# Altium footprint library ACB_PcbLib.PcbLib: 167 footprints (part 5 of 11)
Each footprint in its own frame and in the unit in brackets; x right, y up, seen from the top. Pads: shape width x height; smd on the part's side, far side on the other; paste and mask are expansions set on the pad; w line width, h text height; cw(c..) or ccw(c..) is an arc to the next point about the centre after c.
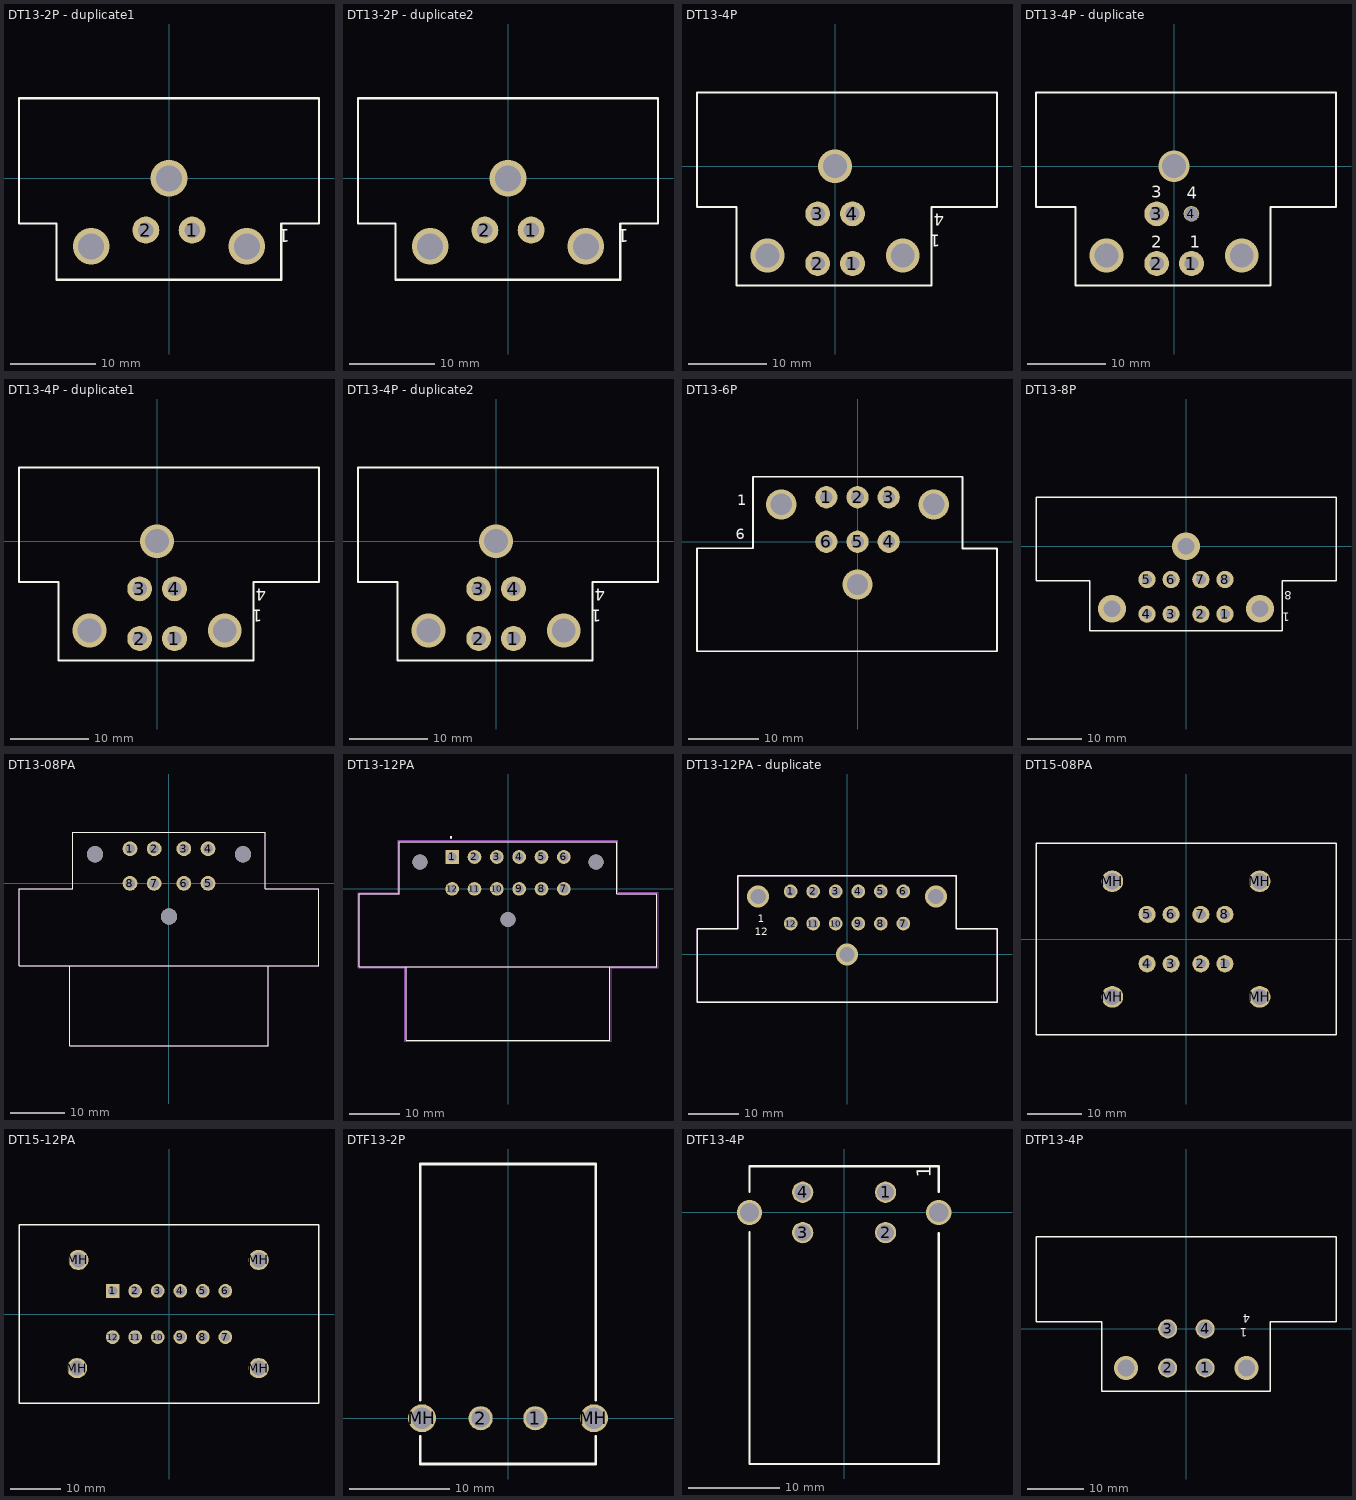
[diagram p4: the footprints below, top view; thin cyan lines are the x and y axes]

## DT13-2P - duplicate1 [mil]
pads (2):
  round 125 hole 72: 1(107.5,-240) 2(-107.5,-240)
via 360.5,-315 diameter 170 hole 120
via -360.5,-315 diameter 170 hole 120
via 0,0 diameter 170 hole 120
Top Overlay:
  lines w10: -521,-470 520,-470 520,-210 695,-210 695,371 ; -521,-465 -521,-210 -695,-210 -695,371 690,371
  text "1" at 560,-235 h60
3D body "DT13-2P.stp": height 1090, standoff -121, extent -695,-475 695,945

## DT13-2P - duplicate2 [mil]
pads (2):
  round 125 hole 72: 1(107.5,-240) 2(-107.5,-240)
via 0,0 diameter 170 hole 120
via -360.5,-315 diameter 170 hole 120
via 360.5,-315 diameter 170 hole 120
Top Overlay:
  lines w10: -521,-470 520,-470 520,-210 695,-210 695,371 ; -521,-465 -521,-210 -695,-210 -695,371 690,371
  text "1" at 560,-235 h60
3D body "DT13-2P.stp": height 1090, standoff -121, extent -695,-475 695,945

## DT13-4P [mil]
pads (4):
  round 125 hole 72: 1(87.5,-490) 2(-87.5,-490) 3(-87.5,-240)
  round 125 hole 72.01: 4(87.5,-240)
via 340.5,-450 diameter 170 hole 120
via -340.5,-450 diameter 170 hole 120
via 0,0 diameter 170 hole 120
Top Overlay:
  lines w10: -500,-205 -695,-205 -695,370 815,370 815,-205 490,-205 ; -495,-205 -495,-600 485,-600 485,-205
  text "1" at 530,-345 h60
  text "4" at 550,-240 h60
3D body "DT13-4P.stp": height 1394, standoff -125, extent -700,-607.5 810,947.5

## DT13-4P - duplicate [mil]
pads (4):
  round 125 hole 72: 1(87.5,-490) 2(-87.5,-490) 3(-87.5,-240)
  round 78.74 hole 70.87: 4(87.5,-240)
via 340.5,-450 diameter 170 hole 120
via -340.5,-450 diameter 170 hole 120
via 0,0 diameter 157.48 hole 120
Top Overlay:
  lines w10: -500,-205 -695,-205 -695,370 815,370 815,-205 490,-205 ; -495,-205 -495,-600 485,-600 485,-205
  text "." at 515,-580 h60
  text "1" at 80,-410 h60
  text "2" at -115,-410 h60
  text "3" at -115,-160 h60
  text "4" at 65,-165 h60
3D body "DT13-4P.stp": height 1394, standoff -125, extent -700,-607.5 810,947.5

## DT13-4P - duplicate1 [mil]
pads (4):
  round 125 hole 72: 1(87.5,-490) 2(-87.5,-490) 3(-87.5,-240) 4(87.5,-240)
via 0,0 diameter 170 hole 120
via -340.5,-450 diameter 170 hole 120
via 340.5,-450 diameter 170 hole 120
Top Overlay:
  lines w10: -500,-205 -695,-205 -695,370 815,370 815,-205 490,-205 ; -495,-205 -495,-600 485,-600 485,-205
  text "4" at 550,-240 h60
  text "1" at 530,-345 h60
3D body "DT13-4P.stp": height 1394, standoff -125, extent -700,-607.5 810,947.5

## DT13-4P - duplicate2 [mil]
pads (4):
  round 125 hole 72: 1(87.5,-490) 2(-87.5,-490) 3(-87.5,-240)
  round 125 hole 72.01: 4(87.5,-240)
via 0,0 diameter 170 hole 120
via -340.5,-450 diameter 170 hole 120
via 340.5,-450 diameter 170 hole 120
Top Overlay:
  lines w10: -500,-205 -695,-205 -695,370 815,370 815,-205 490,-205 ; -495,-205 -495,-600 485,-600 485,-205
  text "4" at 550,-240 h60
  text "1" at 530,-345 h60
3D body "DT13-4P.stp": height 1394, standoff -125, extent -700,-607.5 810,947.5

## DT13-6P [mil]
pads (6):
  round 125 hole 72: 1(-175.2,250) 2(0,250) 3(175.2,250) 4(175.2,0) 5(0,0) 6(-175.2,0)
via 0,-240.16 diameter 170 hole 120
via -428.15,209.65 diameter 170 hole 120
via 428.15,209.65 diameter 170 hole 120
Top Overlay:
  lines w10: -901.57,-615.16 783.46,-615.16 783.46,-37.4 589.57,-37.4 589.57,365.16 -586.61,365.16 -586.61,-36.42 -901.57,-36.42 -901.57,-615.16
  text "1" at -674.21,203.74 h60
  text "6" at -685.04,12.8 h60
3D body "c-dt13-6p-99-3d.stp": height 1402.66, standoff -116.34, extent -903.52,-1182.95 781.48,372.05

## DT13-8P [mil]
pads (8):
  round 125 hole 72: 1(282.5,-490) 2(107.5,-490) 3(-107.5,-490) 4(-282.5,-490) 5(-282.5,-240) 7(107.5,-240)
  round 125 hole 72.01: 6(-107.5,-240) 8(282.5,-240)
via 535,-450 diameter 200 hole 120
via -535,-450 diameter 200 hole 120
via 0,0 diameter 200 hole 120
Top Overlay:
  lines w10: -1085,-250 -695,-250 -695,-610 695,-610 695,-250 1085,-250 1085,355 -1085,355 -1085,-250
  text "1" at 750,-480 h60
  text "8" at 765,-325 h60
3D body "c-dt13-08pc-99-3d.stp": height 1394, standoff -125, extent -1090,-602.5 1080,942.5

## DT13-08PA [mm]
pads (11):
  round 2.715 hole 1.81: 1(-7.175,6.35) 2(-2.73,6.35) 3(2.73,6.35) 4(7.175,6.35) 5(7.175,0) 6(2.73,0) 7(-2.73,0) 8(-7.175,0)
  round 2.99 hole 2.99 unplated: None(-13.59,5.34) None(0,-6.1) None(13.59,5.34)
Top Overlay:
  lines w0.127: -18.225,-15.11 18.225,-15.11 ; -18.225,-15.11 -27.56,-15.11 -27.56,-1 -17.655,-1 -17.655,9.4 17.655,9.4 17.655,-1 27.56,-1 27.56,-15.11 18.225,-15.11 ; -18.225,-15.11 -18.225,-29.84 18.225,-29.84 18.225,-15.11
Mechanical 4:
  lines w0.127: -27.56,-15.11 -18.225,-15.11 ; -27.56,-15.11 -27.56,-1 ; -27.56,-15.11 -18.225,-15.11 ; -27.56,-15.11 -27.56,-1 ; -27.56,-1 -17.655,-1 ; -27.56,-1 -17.655,-1 ; -18.225,-29.84 -18.225,-15.11 ; -18.225,-29.84 18.225,-29.84 ; -18.225,-29.84 -18.225,-15.11 ; -18.225,-29.84 18.225,-29.84 ; -18.225,-15.11 18.225,-15.11 ; -18.225,-15.11 18.225,-15.11 ; -17.655,-1 -17.655,9.4 ; -17.655,-1 -17.655,9.4 ; -17.655,9.4 17.655,9.4 ; -17.655,9.4 17.655,9.4 ; 17.655,-1 17.655,9.4 ; 17.655,-1 27.56,-1 ; 17.655,-1 17.655,9.4 ; 17.655,-1 27.56,-1 ; 18.225,-29.84 18.225,-15.11 ; 18.225,-29.84 18.225,-15.11 ; 18.225,-15.11 27.56,-15.11 ; 18.225,-15.11 27.56,-15.11 ; 27.56,-15.11 27.56,-1 ; 27.56,-15.11 27.56,-1

## DT13-12PA [mm]
pads (15):
  rect 2.715x2.715 hole 1.81: 1(-11.115,6.35)
  round 2.715 hole 1.81: 2(-6.67,6.35) 3(-2.225,6.35) 4(2.225,6.35) 5(6.67,6.35) 6(11.115,6.35) 7(11.115,0) 8(6.67,0) 9(2.225,0) 10(-2.225,0) 11(-6.67,0) 12(-11.115,0)
  round 2.99 hole 2.99 unplated: None(-17.54,5.34) None(0,-6.1) None(17.54,5.34)
Top Overlay:
  circle w0.2: c-11.35,10.25 r0.158
  lines w0.127: -20.28,-15.49 -20.28,-30.1 20.28,-30.1 20.28,-15.49 ; -20.28,-15.49 -29.605,-15.49 -29.605,-1 -21.605,-1 -21.605,9.4 21.605,9.4 21.605,-1 29.605,-1 29.605,-15.49 20.28,-15.49 ; -20.28,-15.49 20.28,-15.49
Mechanical 4:
  lines w0.127: -29.605,-15.49 -29.605,-1 ; -29.605,-15.49 -20.28,-15.49 ; -29.605,-15.49 -29.605,-1 ; -29.605,-15.49 -20.28,-15.49 ; -29.605,-1 -21.605,-1 ; -29.605,-1 -21.605,-1 ; -21.605,-1 -21.605,9.4 ; -21.605,-1 -21.605,9.4 ; -21.605,9.4 21.605,9.4 ; -21.605,9.4 21.605,9.4 ; -20.28,-30.1 20.28,-30.1 ; -20.28,-30.1 -20.28,-15.49 ; -20.28,-30.1 20.28,-30.1 ; -20.28,-30.1 -20.28,-15.49 ; -20.28,-15.49 20.28,-15.49 ; -20.28,-15.49 20.28,-15.49 ; 20.28,-30.1 20.28,-15.49 ; 20.28,-30.1 20.28,-15.49 ; 20.28,-15.49 29.605,-15.49 ; 20.28,-15.49 29.605,-15.49 ; 21.605,-1 29.605,-1 ; 21.605,-1 21.605,9.4 ; 21.605,-1 29.605,-1 ; 21.605,-1 21.605,9.4 ; 29.605,-15.49 29.605,-1 ; 29.605,-15.49 29.605,-1
Mechanical 16:
  lines w0.05: -29.855,-15.74 -29.855,-0.75 -21.85,-0.75 -21.85,9.65 21.85,9.65 21.85,-0.7 29.855,-0.7 29.855,-15.74 20.53,-15.74 20.53,-30.35 -20.53,-30.35 -20.53,-15.74 -29.855,-15.74

## DT13-12PA - duplicate [mm]
pads (12):
  round 2.715 hole 1.81: 1(-11.115,12.446) 2(-6.67,12.446) 3(-2.225,12.446) 4(2.225,12.446) 5(6.67,12.446) 6(11.115,12.446) 7(11.115,6.096) 8(6.67,6.096) 9(2.225,6.096) 10(-2.225,6.096) 11(-6.67,6.096) 12(-11.115,6.096)
via 0,-0.004 diameter 4.318 hole 3.048
via 17.54,11.436 diameter 4.318 hole 3.048
via -17.54,11.436 diameter 4.318 hole 3.048
Top Overlay:
  lines w0.254: -29.605,-9.394 -29.605,5.096 -21.605,5.096 -21.605,15.496 21.605,15.496 21.605,5.096 29.605,5.096 29.605,-9.394 20.28,-9.394 -20.28,-9.394 -29.605,-9.394
  text "1" at -17.653,6.35 h1.52
  text "12" at -18.161,3.81 h1.52
Mechanical 1:
  lines w0.254: -29.605,-9.394 -29.605,5.096 -21.605,5.096 -21.605,15.496 21.605,15.496 21.605,5.096 29.605,5.096 29.605,-9.394 20.28,-9.394 -20.28,-9.394 -29.605,-9.394
3D body "c-dt13-12pa-b016-99-3d.stp": height 35.63, standoff -2.96, extent -29.464,-28.702 29.743,15.494

## DT15-08PA [mil]
pads (12):
  round 125 hole 72: 1(282.5,-179.5) 2(107.5,-179.5) 3(-107.5,-179.5) 4(-282.5,-179.5) 5(-282.5,179.5) 7(107.5,179.5)
  round 125 hole 72.01: 6(-107.5,179.5) 8(282.5,179.5)
  round 157.48 hole 118.11: MH(-535,-420) MH(-535,420) MH(535,-420) MH(535,420)
Top Overlay:
  lines w10: -1089.57,-695.87 1087.6,-695.87 1089.57,-693.9 1089.57,694.88 1087.6,696.85 -1089.57,696.85 -1089.57,-695.87
  text "." at -1061.02,747.05 h60
3D body "c-dt15-08pa-99-3d.stp": height 1181.1, standoff -125.9, extent -1084.99,-694.98 1085.01,693.02

## DT15-12PA [mm]
pads (16):
  rect 2.715x2.715 hole 1.81: 1(-11.115,4.559)
  round 2.715 hole 1.81: 2(-6.67,4.559) 3(-2.225,4.559) 4(2.225,4.559) 5(6.67,4.559) 6(11.115,4.559) 7(11.115,-4.559) 8(6.67,-4.559) 9(2.225,-4.559) 10(-2.225,-4.559) 11(-6.67,-4.559) 12(-11.115,-4.559)
  round 4 hole 2.99: MH(-18.15,-10.668) MH(-17.875,10.668) MH(17.7,-10.668) MH(17.7,10.668)
Top Overlay:
  lines w0.254: -29.604,-17.628 29.604,-17.628 29.604,17.628 -29.604,17.628 -29.604,-17.628
3D body "c-dt15-12pa-b016-99-3d.stp": height 34.8, standoff -3.12, extent -29.629,-17.527 29.579,17.728

## DTF13-2P [mil]
pads (4):
  round 95 hole 72: 1(107.5,0) 2(-107.5,0)
  round 110 hole 84.02: MH(-338,0) MH(338,0)
Top Overlay:
  lines w10: -345,-70 -345,-180 345,-180 345,-70 ; -345,70 -345,1000 345,1000 345,70
  text "." at 395,-95 h60
3D body "c-dtf13-2p-99-3d.stp": height 770, standoff -110, extent -460,-180.26 465.98,1010.26

## DTF13-4P [mil]
pads (4):
  round 92 hole 72: 1(179.5,87.5) 2(179.5,-87.5) 3(-179.5,-87.5) 4(-179.5,87.5)
via 410,0 diameter 110 hole 84
via -410,0 diameter 110 hole 84
Top Overlay:
  lines w10: -410,-85 -410,-1090 410,-1090 410,-90 ; -410,90 -410,200 410,200 410,90
  text "1" at 375,150 h60
3D body "c-dtf13-4p-99-3d.stp": height 933.5, standoff -112.5, extent -540,-1097.5 530,220

## DTP13-4P [mil]
pads (4):
  round 134 hole 104: 1(132,-275) 2(-132,-275) 3(-132,0) 4(132,0)
via 425,-275 diameter 170 hole 120
via -425,-275 diameter 170 hole 120
Top Overlay:
  lines w10: -1060,50 -1060,650 1055,650 1055,50 590,50 590,-440 -595,-440 -595,50 -1060,50
  text "1" at 430,5 h60
  text "4" at 450,105 h60
3D body "DTP13-4P.stp": height 1418.5, standoff -170.08, extent -1070,-440 1060,1397